# Altium footprint library WR-MPC3.PcbLib: 235 footprints (part 4 of 15)
Each footprint in its own frame and in the unit in brackets; x right, y up, seen from the top. Pads: shape width x height; smd on the part's side, far side on the other; paste and mask are expansions set on the pad; w line width, h text height; cw(c..) or ccw(c..) is an arc to the next point about the centre after c.
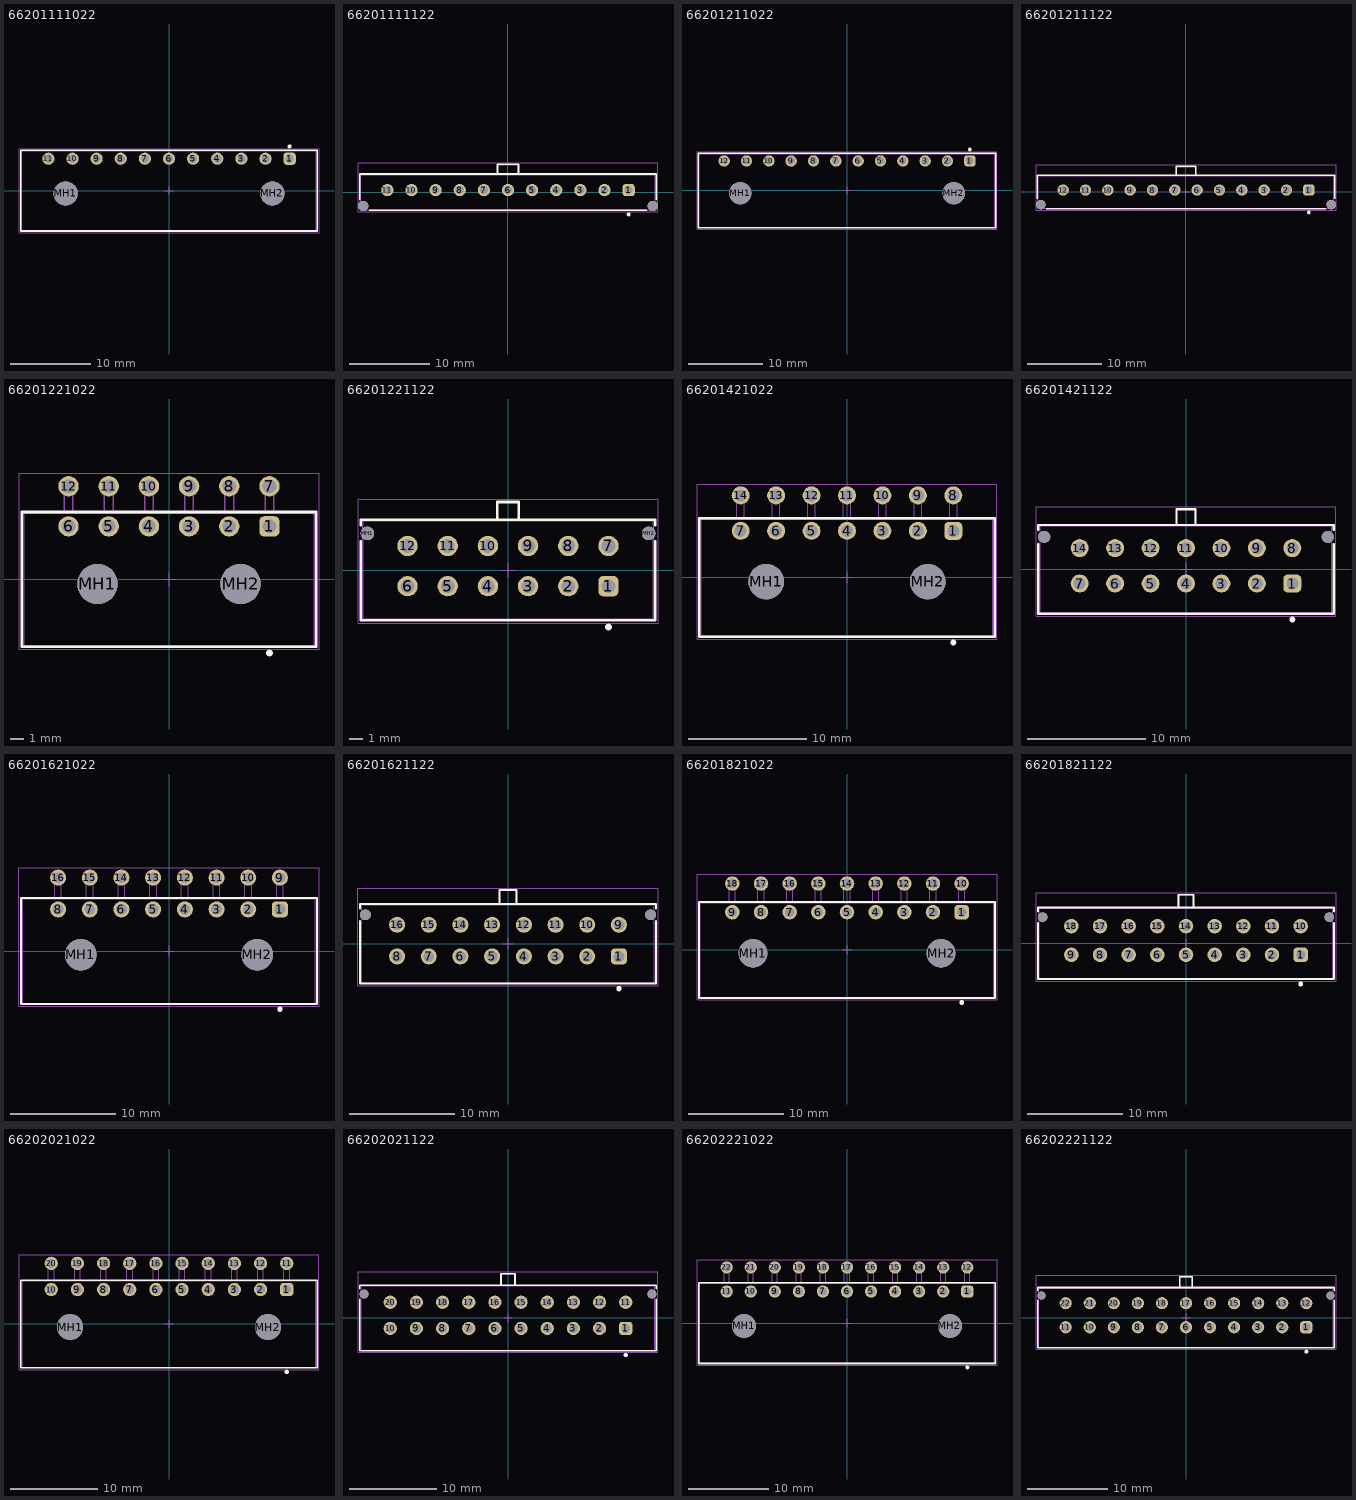
[diagram p3: the footprints below, top view; thin cyan lines are the x and y axes]

## 66201111022 [mm] "3.00mm Male Single Row Angled Header with Plastic Pegs, 11p"
height 5.07
pads (13):
  rrect50% 1.52x1.52 hole 1.02: 1(15,3.97)
  round 1.52 hole 1.02: 2(12,3.97) 3(9,3.97) 4(6,3.97) 5(3,3.97) 6(0,3.97) 7(-3,3.97) 8(-6,3.97) 9(-9,3.97) 10(-12,3.97) 11(-15,3.97)
  round 3 hole 3 unplated: MH1(-12.85,-0.35) MH2(12.85,-0.35)
Top Overlay:
  circle w0.25: c15,5.5 r0.125
  lines w0.2: -18.45,-5.025 18.45,-5.025 18.45,5.025 -18.45,5.025 -18.45,-5.025
Top Designator:
  text ".Designator" at -7.498,-0.5 h1.5
Top Component Outline:
  lines w0.1: -18.325,-4.95 -18.325,4.95 18.325,4.95 18.325,-4.95 -18.325,-4.95
Top 3D Body:
  lines w0.1: -18.325,-4.95 -18.325,4.95 18.325,4.95 18.325,-4.95 -18.325,-4.95
Top Courtyard:
  lines w0.05: -18.65,-5.225 18.65,-5.225 18.65,5.225 -18.65,5.225 -18.65,-5.225
Top Component Center:
  lines w0.05: -0.5,0 0.5,0 ; 0,-0.5 0,0.5
3D body "66201111022.stp": height 5.6, standoff -3.16, extent -18.325,-4.95 18.325,4.95

## 66201111122 [mm] "3.00mm Male Single Row Vertical Header, 11p"
height 11
pads (13):
  rrect50% 1.52x1.52 hole 1.02: 1(15,0.255)
  round 1.52 hole 1.02: 2(12,0.255) 3(9,0.255) 4(6,0.255) 5(3,0.255) 6(0,0.255) 7(-3,0.255) 8(-6,0.255) 9(-9,0.255) 10(-12,0.255) 11(-15,0.255)
  round 1.27 hole 1.27 unplated: MH1(-18,-1.705) MH2(18,-1.705)
Top Overlay:
  circle w0.25: c15,-2.75 r0.125
  lines w0.2: -18.45,-0.91 -18.45,2.26 18.45,2.26 18.45,-0.91 ; -17.255,-2.26 17.255,-2.26 ; -1.3,2.26 -1.3,3.46 1.3,3.46 1.3,2.26
Top Designator:
  text ".Designator" at -7.498,-0.5 h1.5
Top Component Outline:
  lines w0.1: -1.3,2.185 -1.3,3.385 1.3,3.385 1.3,2.185 ; 18.325,-2.185 18.325,2.185 -18.325,2.185 -18.325,-2.185 18.33,-2.185
Top 3D Body:
  lines w0.1: -1.3,2.185 -1.3,3.385 1.3,3.385 1.3,2.185 ; 18.325,-2.185 18.325,2.185 -18.325,2.185 -18.325,-2.185 18.33,-2.185
Top Courtyard:
  lines w0.05: -18.65,-2.46 18.65,-2.46 18.65,3.66 -18.65,3.66 -18.65,-2.46
Top Component Center:
  lines w0.05: -0.5,0 0.5,0 ; 0,-0.5 0,0.5
3D body "66201111122.stp": height 9.93, standoff -3.15, extent -18.322,-2.185 18.328,3.385

## 66201211022 [mm] "3.00mm Male Single Row Angled Header with Plastic Pegs, 12p"
height 5.07
pads (14):
  rrect50% 1.52x1.52 hole 1.02: 1(16.5,3.97)
  round 1.52 hole 1.02: 2(13.5,3.97) 3(10.5,3.97) 4(7.5,3.97) 5(4.5,3.97) 6(1.5,3.97) 7(-1.5,3.97) 8(-4.5,3.97) 9(-7.5,3.97) 10(-10.5,3.97) 11(-13.5,3.97) 12(-16.5,3.97)
  round 3 hole 3 unplated: MH1(-14.35,-0.35) MH2(14.35,-0.35)
Top Overlay:
  circle w0.25: c16.5,5.5 r0.125
  lines w0.2: -19.95,-5.025 -19.95,5.025 19.95,5.025 19.95,-5.025 -19.95,-5.025
Top Designator:
  text ".Designator" at -7.498,-0.5 h1.5
Top Component Outline:
  lines w0.1: -19.825,-4.95 19.825,-4.95 19.825,4.95 -19.825,4.95 -19.825,-4.95
Top 3D Body:
  lines w0.1: -19.825,-4.95 19.825,-4.95 19.825,4.95 -19.825,4.95 -19.825,-4.95
Top Courtyard:
  lines w0.05: -20.15,-5.225 -20.15,5.225 20.15,5.225 20.15,-5.225 -20.15,-5.225
Top Component Center:
  lines w0.05: -0.5,0 0.5,0 ; 0,-0.5 0,0.5
3D body "66201211022.stp": height 5.6, standoff -3.16, extent -19.825,-4.95 19.825,4.95

## 66201211122 [mm] "3.00mm Male Single Row Vertical Header, 12p"
height 11
pads (14):
  rrect50% 1.52x1.52 hole 1.02: 1(16.5,0.255)
  round 1.52 hole 1.02: 2(13.5,0.255) 3(10.5,0.255) 4(7.5,0.255) 5(4.5,0.255) 6(1.5,0.255) 7(-1.5,0.255) 8(-4.5,0.255) 9(-7.5,0.255) 10(-10.5,0.255) 11(-13.5,0.255) 12(-16.5,0.255)
  round 1.27 hole 1.27 unplated: MH1(-19.5,-1.705) MH2(19.5,-1.705)
Top Overlay:
  circle w0.25: c16.5,-2.75 r0.125
  lines w0.2: -19.95,-0.91 -19.95,2.26 19.95,2.26 19.95,-0.91 ; -18.755,-2.26 18.755,-2.26 ; -1.3,2.26 -1.3,3.46 1.3,3.46 1.3,2.26
Top Designator:
  text ".Designator" at -7.498,-0.5 h1.5
Top Component Outline:
  lines w0.1: -1.3,2.185 -1.3,3.385 1.3,3.385 1.3,2.185 ; 19.825,-2.185 19.825,2.185 -19.825,2.185 -19.825,-2.185 19.83,-2.185
Top 3D Body:
  lines w0.1: -1.3,2.185 -1.3,3.385 1.3,3.385 1.3,2.185 ; 19.825,-2.185 19.825,2.185 -19.825,2.185 -19.825,-2.185 19.83,-2.185
Top Courtyard:
  lines w0.05: -20.15,-2.46 -20.15,3.66 20.15,3.66 20.15,-2.46 -20.15,-2.46
Top Component Center:
  lines w0.05: -0.5,0 0.5,0 ; 0,-0.5 0,0.5
3D body "66201211122.stp": height 9.93, standoff -3.15, extent -19.822,-2.185 19.828,3.385

## 66201221022 [mm] "Dual row Right angle header With plastic peg 12p"
height 8.76
pads (14):
  rrect50% 1.52x1.52 hole 1.02: 1(7.5,3.95)
  round 1.52 hole 1.02: 2(4.5,3.95) 3(1.5,3.95) 4(-1.5,3.95) 5(-4.5,3.95) 6(-7.5,3.95) 7(7.5,6.95) 8(4.5,6.95) 9(1.5,6.95) 10(-1.5,6.95) 11(-4.5,6.95) 12(-7.5,6.95)
  round 3 hole 3 unplated: MH1(-5.34,-0.35) MH2(5.34,-0.35)
Top Overlay:
  circle w0.25: c7.5,-5.5 r0.125
  lines w0.2: -11,-5.025 -11,5.025 11,5.025 11,-5.025 -11,-5.025
Top Designator:
  text ".Designator" at -7.498,-0.5 h1.5
Top Component Outline:
  lines w0.1: -7.82,4.95 -7.82,7.27 -7.18,7.27 -7.18,4.95 ; -4.82,4.95 -4.82,7.27 -4.18,7.27 -4.18,4.95 ; -1.82,4.95 -1.82,7.27 -1.18,7.27 -1.18,4.95 ; 1.18,4.95 1.18,7.27 1.82,7.27 1.82,4.95 ; 4.18,4.95 4.18,7.27 4.82,7.27 4.82,4.95 ; 7.18,4.95 7.18,7.27 7.82,7.27 7.82,4.95 ; -10.85,-4.95 -10.85,4.95 10.85,4.95 10.85,-4.95 -10.85,-4.95
Top 3D Body:
  lines w0.1: -7.82,4.95 -7.82,7.27 -7.18,7.27 -7.18,4.95 ; -4.82,4.95 -4.82,7.27 -4.18,7.27 -4.18,4.95 ; -1.82,4.95 -1.82,7.27 -1.18,7.27 -1.18,4.95 ; 1.18,4.95 1.18,7.27 1.82,7.27 1.82,4.95 ; 4.18,4.95 4.18,7.27 4.82,7.27 4.82,4.95 ; 7.18,4.95 7.18,7.27 7.82,7.27 7.82,4.95 ; -10.85,-4.95 10.85,-4.95 10.85,4.95 -10.85,4.95 -10.85,-4.95
Top Courtyard:
  lines w0.05: -11.2,-5.225 -11.2,7.91 11.2,7.91 11.2,-5.225 -11.2,-5.225
Top Component Center:
  lines w0.05: -0.5,0 0.5,0 ; 0,-0.5 0,0.5
3D body "62001221022.stp": height 8.79, standoff -3.17, extent -10.85,-4.95 10.85,7.27

## 66201221122 [mm] "Dual row Vertical header 12p"
height 9.9
pads (14):
  rrect50% 1.52x1.52 hole 1.02: 1(7.5,-1.2)
  round 1.52 hole 1.02: 2(4.5,-1.2) 3(1.5,-1.2) 4(-1.5,-1.2) 5(-4.5,-1.2) 6(-7.5,-1.2) 7(7.5,1.8) 8(4.5,1.8) 9(1.5,1.8) 10(-1.5,1.8) 11(-4.5,1.8) 12(-7.5,1.8)
  round 1.02 hole 1.02 unplated: MH1(-10.5,2.74) MH2(10.5,2.74)
Top Overlay:
  circle w0.25: c7.5,-4.25 r0.125
  lines w0.2: -11,2.145 -11,-3.755 11,-3.755 11,2.145 ; -11,3.345 -11,3.755 11,3.755 11,3.345 ; -0.8,3.755 -0.8,5.08 0.8,5.08 0.8,3.755
Top Designator:
  text ".Designator" at -7.498,-0.5 h1.5
Top Component Outline:
  lines w0.1: -0.8,3.68 -0.8,5.08 0.8,5.08 0.8,3.68 ; -10.85,-3.68 10.85,-3.68 10.85,3.68 -10.85,3.68 -10.85,-3.68
Top 3D Body:
  lines w0.1: -0.8,3.68 -0.8,5.08 0.8,5.08 0.8,3.68 ; -10.85,-3.68 10.85,-3.68 10.85,3.68 -10.85,3.68 -10.85,-3.68
Top Courtyard:
  lines w0.05: -11.2,-3.955 11.2,-3.955 11.2,5.28 -11.2,5.28 -11.2,-3.955
Top Component Center:
  lines w0.05: -0.5,0 0.5,0 ; 0,-0.5 0,0.5
3D body "66201221122.stp": height 9.93, standoff -3.17, extent -10.85,-3.68 10.85,5.08

## 66201421022 [mm] "Dual row Right angle header With plastic peg 14p"
height 8.76
pads (16):
  rrect50% 1.52x1.52 hole 1.02: 1(9,3.95)
  round 1.52 hole 1.02: 2(6,3.95) 3(3,3.95) 4(0,3.95) 5(-3,3.95) 6(-6,3.95) 7(-9,3.95) 8(9,6.95) 9(6,6.95) 10(3,6.95) 11(0,6.95) 12(-3,6.95) 13(-6,6.95) 14(-9,6.95)
  round 3 hole 3 unplated: MH1(-6.84,-0.35) MH2(6.84,-0.35)
Top Overlay:
  circle w0.25: c9,-5.5 r0.125
  lines w0.2: -12.5,-5.025 -12.5,5.025 12.5,5.025 12.5,-5.025 -12.5,-5.025
Top Designator:
  text ".Designator" at -7.498,-0.5 h1.5
Top Component Outline:
  lines w0.1: -9.32,4.95 -9.32,7.27 -8.68,7.27 -8.68,4.95 ; -6.32,4.95 -6.32,7.27 -5.68,7.27 -5.68,4.95 ; -3.32,4.95 -3.32,7.27 -2.68,7.27 -2.68,4.95 ; -0.32,4.95 -0.32,7.27 0.32,7.27 0.32,4.95 ; 2.68,4.95 2.68,7.27 3.32,7.27 3.32,4.95 ; 5.68,4.95 5.68,7.27 6.32,7.27 6.32,4.95 ; 8.68,4.95 8.68,7.27 9.32,7.27 9.32,4.95 ; -12.35,-4.95 -12.35,4.95 12.35,4.95 12.35,-4.95 -12.35,-4.95
Top 3D Body:
  lines w0.1: -9.32,4.95 -9.32,7.27 -8.68,7.27 -8.68,4.95 ; -6.32,4.95 -6.32,7.27 -5.68,7.27 -5.68,4.95 ; -3.32,4.95 -3.32,7.27 -2.68,7.27 -2.68,4.95 ; -0.32,4.95 -0.32,7.27 0.32,7.27 0.32,4.95 ; 2.68,4.95 2.68,7.27 3.32,7.27 3.32,4.95 ; 5.68,4.95 5.68,7.27 6.32,7.27 6.32,4.95 ; 8.68,4.95 8.68,7.27 9.32,7.27 9.32,4.95 ; -12.35,-4.95 12.35,-4.95 12.35,4.95 -12.35,4.95 -12.35,-4.95
Top Courtyard:
  lines w0.05: -12.7,-5.225 -12.7,7.91 12.7,7.91 12.7,-5.225 -12.7,-5.225
Top Component Center:
  lines w0.05: -0.5,0 0.5,0 ; 0,-0.5 0,0.5
3D body "62001421022.stp": height 8.79, standoff -3.17, extent -12.35,-4.95 12.35,7.27

## 66201421122 [mm] "Dual row Vertical header 14p"
height 9.9
pads (16):
  rrect50% 1.52x1.52 hole 1.02: 1(9,-1.2)
  round 1.52 hole 1.02: 2(6,-1.2) 3(3,-1.2) 4(0,-1.2) 5(-3,-1.2) 6(-6,-1.2) 7(-9,-1.2) 8(9,1.8) 9(6,1.8) 10(3,1.8) 11(0,1.8) 12(-3,1.8) 13(-6,1.8) 14(-9,1.8)
  round 1.02 hole 1.02 unplated: MH1(-12,2.74) MH2(12,2.74)
Top Overlay:
  circle w0.25: c9,-4.25 r0.125
  lines w0.2: -12.5,2.145 -12.5,-3.755 12.5,-3.755 12.5,2.145 ; -12.5,3.345 -12.5,3.755 12.5,3.755 12.5,3.345 ; -0.8,3.755 -0.8,5.08 0.8,5.08 0.8,3.755
Top Designator:
  text ".Designator" at -7.498,-0.5 h1.5
Top Component Outline:
  lines w0.1: -0.8,3.68 -0.8,5.08 0.8,5.08 0.8,3.68 ; -12.35,-3.68 12.35,-3.68 12.35,3.68 -12.35,3.68 -12.35,-3.68
Top 3D Body:
  lines w0.1: -0.8,3.68 -0.8,5.08 0.8,5.08 0.8,3.68 ; -12.35,-3.68 12.35,-3.68 12.35,3.68 -12.35,3.68 -12.35,-3.68
Top Courtyard:
  lines w0.05: -12.7,-3.955 12.7,-3.955 12.7,5.28 -12.7,5.28 -12.7,-3.955
Top Component Center:
  lines w0.05: -0.5,0 0.5,0 ; 0,-0.5 0,0.5
3D body "66201421122.stp": height 9.93, standoff -3.17, extent -12.35,-3.68 12.35,5.08

## 66201621022 [mm] "Dual row Right angle header With plastic peg 16p"
height 8.76
pads (18):
  rrect50% 1.52x1.52 hole 1.02: 1(10.5,3.95)
  round 1.52 hole 1.02: 2(7.5,3.95) 3(4.5,3.95) 4(1.5,3.95) 5(-1.5,3.95) 6(-4.5,3.95) 7(-7.5,3.95) 8(-10.5,3.95) 9(10.5,6.95) 10(7.5,6.95) 11(4.5,6.95) 12(1.5,6.95) 13(-1.5,6.95) 14(-4.5,6.95) 15(-7.5,6.95) 16(-10.5,6.95)
  round 3 hole 3 unplated: MH1(-8.34,-0.35) MH2(8.34,-0.35)
Top Overlay:
  circle w0.25: c10.5,-5.5 r0.125
  lines w0.2: -14,-5.025 14,-5.025 14,5.025 -14,5.025 -14,-5.025
Top Designator:
  text ".Designator" at -7.498,-0.5 h1.5
Top Component Outline:
  lines w0.1: -10.82,4.95 -10.82,7.27 -10.18,7.27 -10.18,4.95 ; -7.82,4.95 -7.82,7.27 -7.18,7.27 -7.18,4.95 ; -4.82,4.95 -4.82,7.27 -4.18,7.27 -4.18,4.95 ; -1.82,4.95 -1.82,7.27 -1.18,7.27 -1.18,4.95 ; 1.18,4.95 1.18,7.27 1.82,7.27 1.82,4.95 ; 4.18,4.95 4.18,7.27 4.82,7.27 4.82,4.95 ; 7.18,4.95 7.18,7.27 7.82,7.27 7.82,4.95 ; 10.18,4.95 10.18,7.27 10.82,7.27 10.82,4.95 ; -13.85,-4.95 -13.85,4.95 13.85,4.95 13.85,-4.95 -13.85,-4.95
Top 3D Body:
  lines w0.1: -10.82,4.95 -10.82,7.27 -10.18,7.27 -10.18,4.95 ; -7.82,4.95 -7.82,7.27 -7.18,7.27 -7.18,4.95 ; -4.82,4.95 -4.82,7.27 -4.18,7.27 -4.18,4.95 ; -1.82,4.95 -1.82,7.27 -1.18,7.27 -1.18,4.95 ; 1.18,4.95 1.18,7.27 1.82,7.27 1.82,4.95 ; 4.18,4.95 4.18,7.27 4.82,7.27 4.82,4.95 ; 7.18,4.95 7.18,7.27 7.82,7.27 7.82,4.95 ; 10.18,4.95 10.18,7.27 10.82,7.27 10.82,4.95 ; -13.85,-4.95 -13.85,4.95 13.85,4.95 13.85,-4.95 -13.85,-4.95
Top Courtyard:
  lines w0.05: -14.2,-5.225 14.2,-5.225 14.2,7.91 -14.2,7.91 -14.2,-5.225
Top Component Center:
  lines w0.05: -0.5,0 0.5,0 ; 0,-0.5 0,0.5
3D body "62001621022.stp": height 8.79, standoff -3.17, extent -13.85,-4.95 13.85,7.27

## 66201621122 [mm] "Dual row Vertical header 16p"
height 9.9
pads (18):
  rrect50% 1.52x1.52 hole 1.02: 1(10.5,-1.2)
  round 1.52 hole 1.02: 2(7.5,-1.2) 3(4.5,-1.2) 4(1.5,-1.2) 5(-1.5,-1.2) 6(-4.5,-1.2) 7(-7.5,-1.2) 8(-10.5,-1.2) 9(10.5,1.8) 10(7.5,1.8) 11(4.5,1.8) 12(1.5,1.8) 13(-1.5,1.8) 14(-4.5,1.8) 15(-7.5,1.8) 16(-10.5,1.8)
  round 1.02 hole 1.02 unplated: MH1(-13.5,2.74) MH2(13.5,2.74)
Top Overlay:
  circle w0.25: c10.5,-4.25 r0.125
  lines w0.2: -14,2.145 -14,-3.755 14,-3.755 14,2.145 ; -14,3.345 -14,3.755 14,3.755 14,3.345 ; -0.8,3.755 -0.8,5.08 0.8,5.08 0.8,3.755
Top Designator:
  text ".Designator" at -7.498,-0.5 h1.5
Top Component Outline:
  lines w0.1: -0.8,3.68 -0.8,5.08 0.8,5.08 0.8,3.68 ; -13.85,-3.68 -13.85,3.68 13.85,3.68 13.85,-3.68 -13.85,-3.68
Top 3D Body:
  lines w0.1: -0.8,3.68 -0.8,5.08 0.8,5.08 0.8,3.68 ; -13.85,-3.68 -13.85,3.68 13.85,3.68 13.85,-3.68 -13.85,-3.68
Top Courtyard:
  lines w0.05: -14.2,-3.955 -14.2,5.28 14.2,5.28 14.2,-3.955 -14.2,-3.955
Top Component Center:
  lines w0.05: -0.5,0 0.5,0 ; 0,-0.5 0,0.5
3D body "66201621122.stp": height 9.93, standoff -3.17, extent -13.85,-3.68 13.85,5.08

## 66201821022 [mm] "Dual row Right angle header With plastic peg 18p"
height 8.76
pads (20):
  rrect50% 1.52x1.52 hole 1.02: 1(12,3.95)
  round 1.52 hole 1.02: 2(9,3.95) 3(6,3.95) 4(3,3.95) 5(0,3.95) 6(-3,3.95) 7(-6,3.95) 8(-9,3.95) 9(-12,3.95) 10(12,6.95) 11(9,6.95) 12(6,6.95) 13(3,6.95) 14(0,6.95) 15(-3,6.95) 16(-6,6.95) 17(-9,6.95) 18(-12,6.95)
  round 3 hole 3 unplated: MH1(-9.84,-0.35) MH2(9.84,-0.35)
Top Overlay:
  circle w0.25: c12,-5.5 r0.125
  lines w0.2: -15.5,-5.025 -15.5,5.025 15.5,5.025 15.5,-5.025 -15.5,-5.025
Top Designator:
  text ".Designator" at -7.498,-0.5 h1.5
Top Component Outline:
  lines w0.1: -12.32,4.95 -12.32,7.27 -11.68,7.27 -11.68,4.95 ; -9.32,4.95 -9.32,7.27 -8.68,7.27 -8.68,4.95 ; -6.32,4.95 -6.32,7.27 -5.68,7.27 -5.68,4.95 ; -3.32,4.95 -3.32,7.27 -2.68,7.27 -2.68,4.95 ; -0.32,4.95 -0.32,7.27 0.32,7.27 0.32,4.95 ; 2.68,4.95 2.68,7.27 3.32,7.27 3.32,4.95 ; 5.68,4.95 5.68,7.27 6.32,7.27 6.32,4.95 ; 8.68,4.95 8.68,7.27 9.32,7.27 9.32,4.95 ; 11.68,4.95 11.68,7.27 12.32,7.27 12.32,4.95 ; -15.35,-4.95 -15.35,4.95 15.35,4.95 15.35,-4.95 -15.35,-4.95
Top 3D Body:
  lines w0.1: -12.32,4.95 -12.32,7.27 -11.68,7.27 -11.68,4.95 ; -9.32,4.95 -9.32,7.27 -8.68,7.27 -8.68,4.95 ; -6.32,4.95 -6.32,7.27 -5.68,7.27 -5.68,4.95 ; -3.32,4.95 -3.32,7.27 -2.68,7.27 -2.68,4.95 ; -0.32,4.95 -0.32,7.27 0.32,7.27 0.32,4.95 ; 2.68,4.95 2.68,7.27 3.32,7.27 3.32,4.95 ; 5.68,4.95 5.68,7.27 6.32,7.27 6.32,4.95 ; 8.68,4.95 8.68,7.27 9.32,7.27 9.32,4.95 ; 11.68,4.95 11.68,7.27 12.32,7.27 12.32,4.95 ; -15.35,-4.95 15.35,-4.95 15.35,4.95 -15.35,4.95 -15.35,-4.95
Top Courtyard:
  lines w0.05: -15.7,-5.225 -15.7,7.91 15.7,7.91 15.7,-5.225 -15.7,-5.225
Top Component Center:
  lines w0.05: -0.5,0 0.5,0 ; 0,-0.5 0,0.5
3D body "62001821022.stp": height 8.79, standoff -3.17, extent -15.35,-4.95 15.35,7.27

## 66201821122 [mm] "Dual row Vertical header 18p"
height 9.9
pads (20):
  rrect50% 1.52x1.52 hole 1.02: 1(12,-1.2)
  round 1.52 hole 1.02: 2(9,-1.2) 3(6,-1.2) 4(3,-1.2) 5(0,-1.2) 6(-3,-1.2) 7(-6,-1.2) 8(-9,-1.2) 9(-12,-1.2) 10(12,1.8) 11(9,1.8) 12(6,1.8) 13(3,1.8) 14(0,1.8) 15(-3,1.8) 16(-6,1.8) 17(-9,1.8) 18(-12,1.8)
  round 1.02 hole 1.02 unplated: MH1(-15,2.74) MH2(15,2.74)
Top Overlay:
  circle w0.25: c12,-4.25 r0.125
  lines w0.2: -15.5,2.145 -15.5,-3.755 15.5,-3.755 15.5,2.145 ; -15.5,3.345 -15.5,3.755 15.5,3.755 15.5,3.345 ; -0.8,3.755 -0.8,5.08 0.8,5.08 0.8,3.755
Top Designator:
  text ".Designator" at -7.498,-0.5 h1.5
Top Component Outline:
  lines w0.1: -0.8,3.68 -0.8,5.08 0.8,5.08 0.8,3.68 ; -15.35,-3.68 -15.35,3.68 15.35,3.68 15.35,-3.68 -15.35,-3.68
Top 3D Body:
  lines w0.1: -0.8,3.68 -0.8,5.08 0.8,5.08 0.8,3.68 ; -15.35,-3.68 -15.35,3.68 15.35,3.68 15.35,-3.68 -15.35,-3.68
Top Courtyard:
  lines w0.05: -15.7,-3.955 -15.7,5.28 15.7,5.28 15.7,-3.955 -15.7,-3.955
Top Component Center:
  lines w0.05: -0.5,0 0.5,0 ; 0,-0.5 0,0.5
3D body "66201821122.stp": height 9.93, standoff -3.17, extent -15.35,-3.68 15.35,5.08

## 66202021022 [mm] "Dual row Right angle header With plastic peg 20p"
height 8.76
pads (22):
  rrect50% 1.52x1.52 hole 1.02: 1(13.5,3.95)
  round 1.52 hole 1.02: 2(10.5,3.95) 3(7.5,3.95) 4(4.5,3.95) 5(1.5,3.95) 6(-1.5,3.95) 7(-4.5,3.95) 8(-7.5,3.95) 9(-10.5,3.95) 10(-13.5,3.95) 11(13.5,6.95) 12(10.5,6.95) 13(7.5,6.95) 14(4.5,6.95) 15(1.5,6.95) 16(-1.5,6.95) 17(-4.5,6.95) 18(-7.5,6.95) 19(-10.5,6.95) 20(-13.5,6.95)
  round 3 hole 3 unplated: MH1(-11.34,-0.35) MH2(11.34,-0.35)
Top Overlay:
  circle w0.25: c13.5,-5.5 r0.125
  lines w0.2: -17,-5.025 -17,5.025 17,5.025 17,-5.025 -17,-5.025
Top Designator:
  text ".Designator" at -7.498,-0.5 h1.5
Top Component Outline:
  lines w0.1: -13.82,4.95 -13.82,7.27 -13.18,7.27 -13.18,4.95 ; -10.82,4.95 -10.82,7.27 -10.18,7.27 -10.18,4.95 ; -7.82,4.95 -7.82,7.27 -7.18,7.27 -7.18,4.95 ; -4.82,4.95 -4.82,7.27 -4.18,7.27 -4.18,4.95 ; -1.82,4.95 -1.82,7.27 -1.18,7.27 -1.18,4.95 ; 1.18,4.95 1.18,7.27 1.82,7.27 1.82,4.95 ; 4.18,4.95 4.18,7.27 4.82,7.27 4.82,4.95 ; 7.18,4.95 7.18,7.27 7.82,7.27 7.82,4.95 ; 10.18,4.95 10.18,7.27 10.82,7.27 10.82,4.95 ; 13.18,4.95 13.18,7.27 13.82,7.27 13.82,4.95 ; -16.85,-4.95 -16.85,4.95 16.85,4.95 16.85,-4.95 -16.85,-4.95
Top 3D Body:
  lines w0.1: -13.82,4.95 -13.82,7.27 -13.18,7.27 -13.18,4.95 ; -10.82,4.95 -10.82,7.27 -10.18,7.27 -10.18,4.95 ; -7.82,4.95 -7.82,7.27 -7.18,7.27 -7.18,4.95 ; -4.82,4.95 -4.82,7.27 -4.18,7.27 -4.18,4.95 ; -1.82,4.95 -1.82,7.27 -1.18,7.27 -1.18,4.95 ; 1.18,4.95 1.18,7.27 1.82,7.27 1.82,4.95 ; 4.18,4.95 4.18,7.27 4.82,7.27 4.82,4.95 ; 7.18,4.95 7.18,7.27 7.82,7.27 7.82,4.95 ; 10.18,4.95 10.18,7.27 10.82,7.27 10.82,4.95 ; 13.18,4.95 13.18,7.27 13.82,7.27 13.82,4.95 ; -16.85,-4.95 16.85,-4.95 16.85,4.95 -16.85,4.95 -16.85,-4.95
Top Courtyard:
  lines w0.05: -17.2,-5.225 -17.2,7.91 17.2,7.91 17.2,-5.225 -17.2,-5.225
Top Component Center:
  lines w0.05: -0.5,0 0.5,0 ; 0,-0.5 0,0.5
3D body "62002021022.stp": height 8.79, standoff -3.17, extent -16.85,-4.95 16.85,7.27

## 66202021122 [mm] "Dual row Vertical header 20p"
height 9.9
pads (22):
  rrect50% 1.52x1.52 hole 1.02: 1(13.5,-1.2)
  round 1.52 hole 1.02: 2(10.5,-1.2) 3(7.5,-1.2) 4(4.5,-1.2) 5(1.5,-1.2) 6(-1.5,-1.2) 7(-4.5,-1.2) 8(-7.5,-1.2) 9(-10.5,-1.2) 10(-13.5,-1.2) 11(13.5,1.8) 12(10.5,1.8) 13(7.5,1.8) 14(4.5,1.8) 15(1.5,1.8) 16(-1.5,1.8) 17(-4.5,1.8) 18(-7.5,1.8) 19(-10.5,1.8) 20(-13.5,1.8)
  round 1.02 hole 1.02 unplated: MH1(-16.5,2.74) MH2(16.5,2.74)
Top Overlay:
  circle w0.25: c13.5,-4.25 r0.125
  lines w0.2: -17,2.145 -17,-3.755 17,-3.755 17,2.145 ; -17,3.345 -17,3.755 17,3.755 17,3.345 ; -0.8,3.755 -0.8,5.08 0.8,5.08 0.8,3.755
Top Designator:
  text ".Designator" at -7.498,-0.5 h1.5
Top Component Outline:
  lines w0.1: -0.8,3.68 -0.8,5.08 0.8,5.08 0.8,3.68 ; -16.85,-3.68 -16.85,3.68 16.85,3.68 16.85,-3.68 -16.85,-3.68
Top 3D Body:
  lines w0.1: -0.8,3.68 -0.8,5.08 0.8,5.08 0.8,3.68 ; -16.85,-3.68 -16.85,3.68 16.85,3.68 16.85,-3.68 -16.85,-3.68
Top Courtyard:
  lines w0.05: -17.2,-3.955 -17.2,5.28 17.2,5.28 17.2,-3.955 -17.2,-3.955
Top Component Center:
  lines w0.05: -0.5,0 0.5,0 ; 0,-0.5 0,0.5
3D body "66202021122.stp": height 9.93, standoff -3.17, extent -16.85,-3.68 16.85,5.08

## 66202221022 [mm] "Dual row Right angle header With plastic peg 22p"
height 8.76
pads (24):
  rrect50% 1.52x1.52 hole 1.02: 1(15,3.95)
  round 1.52 hole 1.02: 2(12,3.95) 3(9,3.95) 4(6,3.95) 5(3,3.95) 6(0,3.95) 7(-3,3.95) 8(-6,3.95) 9(-9,3.95) 10(-12,3.95) 11(-15,3.95) 12(15,6.95) 13(12,6.95) 14(9,6.95) 15(6,6.95) 16(3,6.95) 17(0,6.95) 18(-3,6.95) 19(-6,6.95) 20(-9,6.95) 21(-12,6.95) 22(-15,6.95)
  round 3 hole 3 unplated: MH1(-12.84,-0.35) MH2(12.84,-0.35)
Top Overlay:
  circle w0.25: c15,-5.5 r0.125
  lines w0.2: -18.5,-5.025 -18.5,5.025 18.5,5.025 18.5,-5.025 -18.5,-5.025
Top Designator:
  text ".Designator" at -7.498,-0.5 h1.5
Top Component Outline:
  lines w0.1: -15.32,4.95 -15.32,7.27 -14.68,7.27 -14.68,4.95 ; -12.32,4.95 -12.32,7.27 -11.68,7.27 -11.68,4.95 ; -9.32,4.95 -9.32,7.27 -8.68,7.27 -8.68,4.95 ; -6.32,4.95 -6.32,7.27 -5.68,7.27 -5.68,4.95 ; -3.32,4.95 -3.32,7.27 -2.68,7.27 -2.68,4.95 ; -0.32,4.95 -0.32,7.27 0.32,7.27 0.32,4.95 ; 2.68,4.95 2.68,7.27 3.32,7.27 3.32,4.95 ; 5.68,4.95 5.68,7.27 6.32,7.27 6.32,4.95 ; 8.68,4.95 8.68,7.27 9.32,7.27 9.32,4.95 ; 11.68,4.95 11.68,7.27 12.32,7.27 12.32,4.95 ; 14.68,4.95 14.68,7.27 15.32,7.27 15.32,4.95 ; -18.35,-4.95 -18.35,4.95 18.35,4.95 18.35,-4.95 -18.35,-4.95
Top 3D Body:
  lines w0.1: -15.32,4.95 -15.32,7.27 -14.68,7.27 -14.68,4.95 ; -12.32,4.95 -12.32,7.27 -11.68,7.27 -11.68,4.95 ; -9.32,4.95 -9.32,7.27 -8.68,7.27 -8.68,4.95 ; -6.32,4.95 -6.32,7.27 -5.68,7.27 -5.68,4.95 ; -3.32,4.95 -3.32,7.27 -2.68,7.27 -2.68,4.95 ; -0.32,4.95 -0.32,7.27 0.32,7.27 0.32,4.95 ; 2.68,4.95 2.68,7.27 3.32,7.27 3.32,4.95 ; 5.68,4.95 5.68,7.27 6.32,7.27 6.32,4.95 ; 8.68,4.95 8.68,7.27 9.32,7.27 9.32,4.95 ; 11.68,4.95 11.68,7.27 12.32,7.27 12.32,4.95 ; 14.68,4.95 14.68,7.27 15.32,7.27 15.32,4.95 ; -18.35,-4.95 18.35,-4.95 18.35,4.95 -18.35,4.95 -18.35,-4.95
Top Courtyard:
  lines w0.05: -18.7,-5.225 -18.7,7.91 18.7,7.91 18.7,-5.225 -18.7,-5.225
Top Component Center:
  lines w0.05: -0.5,0 0.5,0 ; 0,-0.5 0,0.5
3D body "62002221022.stp": height 8.79, standoff -3.17, extent -18.35,-4.95 18.35,7.27

## 66202221122 [mm] "Dual row Vertical header 22p"
height 9.9
pads (24):
  rrect50% 1.52x1.52 hole 1.02: 1(15,-1.2)
  round 1.52 hole 1.02: 2(12,-1.2) 3(9,-1.2) 4(6,-1.2) 5(3,-1.2) 6(0,-1.2) 7(-3,-1.2) 8(-6,-1.2) 9(-9,-1.2) 10(-12,-1.2) 11(-15,-1.2) 12(15,1.8) 13(12,1.8) 14(9,1.8) 15(6,1.8) 16(3,1.8) 17(0,1.8) 18(-3,1.8) 19(-6,1.8) 20(-9,1.8) 21(-12,1.8) 22(-15,1.8)
  round 1.02 hole 1.02 unplated: MH1(-18,2.74) MH2(18,2.74)
Top Overlay:
  circle w0.25: c15,-4.25 r0.125
  lines w0.2: -18.5,2.145 -18.5,-3.755 18.5,-3.755 18.5,2.145 ; -18.5,3.345 -18.5,3.755 18.5,3.755 18.5,3.345 ; -0.8,3.755 -0.8,5.08 0.8,5.08 0.8,3.755
Top Designator:
  text ".Designator" at -7.498,-0.5 h1.5
Top Component Outline:
  lines w0.1: -0.8,3.68 -0.8,5.08 0.8,5.08 0.8,3.68 ; -18.35,-3.68 18.35,-3.68 18.35,3.68 -18.35,3.68 -18.35,-3.68
Top 3D Body:
  lines w0.1: -0.8,3.68 -0.8,5.08 0.8,5.08 0.8,3.68 ; -18.35,-3.68 18.35,-3.68 18.35,3.68 -18.35,3.68 -18.35,-3.68
Top Courtyard:
  lines w0.05: -18.7,-3.955 18.7,-3.955 18.7,5.28 -18.7,5.28 -18.7,-3.955
Top Component Center:
  lines w0.05: -0.5,0 0.5,0 ; 0,-0.5 0,0.5
3D body "66202221122.stp": height 9.93, standoff -3.17, extent -18.35,-3.68 18.35,5.08